# Altium integrated library P6KE36A.IntLib: 1 symbol
Pins are listed as number, name and electrical type; pins without a type are passive.

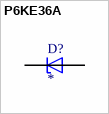
[diagram p0: symbol P6KE36A]

## P6KE36A
designator D?
MP: P6KE36A; Package: None; Price: None; Value: *; Availability: Unavailable
footprint DIOAD1300W80L670D310
pins: A, C